# Altium schematic symbol library Crystal-HC-49.SchLib: 1 symbol
Pins are listed as number, name and electrical type; pins without a type are passive.

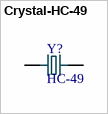
[diagram p0: symbol Crystal-HC-49]

## Crystal-HC-49
designator Y?, comment HC-49
CRYSTAL, 12MHz, 20PF, SMD; MP: FOXSDLF/120-20; MF: Fox; Package: HC49/US Integrated Device Technology; SnapEDA_Link: https://www.snapeda.com/parts/FOXSDLF/120-20/Fox%20Electronics/view-part/580261/?ref=snap; Price: None; Availability: Unavailable; Value: Crystal
footprint Crystal-HC-49 (XTAL1170X500X450)
pins: 1, 2